# Altium schematic symbol library Visual.SchLib: 4 symbols
Pins are listed as number, name and electrical type; pins without a type are passive.

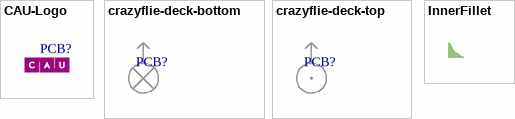
[diagram p0: symbols CAU-Logo to InnerFillet]

## CAU-Logo
designator PCB?  (value not drawn)
footprint CAU-Logo (width 1cm)

## crazyflie-deck-bottom
designator PCB?  (value not drawn)
footprint CRAZYFLIE-DECK-BOTTOM

## crazyflie-deck-top
designator PCB?  (value not drawn)
footprint crazyflie-deck-top

## InnerFillet
designator *  (value not drawn)